# Altium footprint library PS1223-D32_R1_00301.PcbLib: 3 footprints
Each footprint in its own frame and in the unit in brackets; x right, y up, seen from the top. Pads: shape width x height; smd on the part's side, far side on the other; paste and mask are expansions set on the pad; w line width, h text height; cw(c..) or ccw(c..) is an arc to the next point about the centre after c.
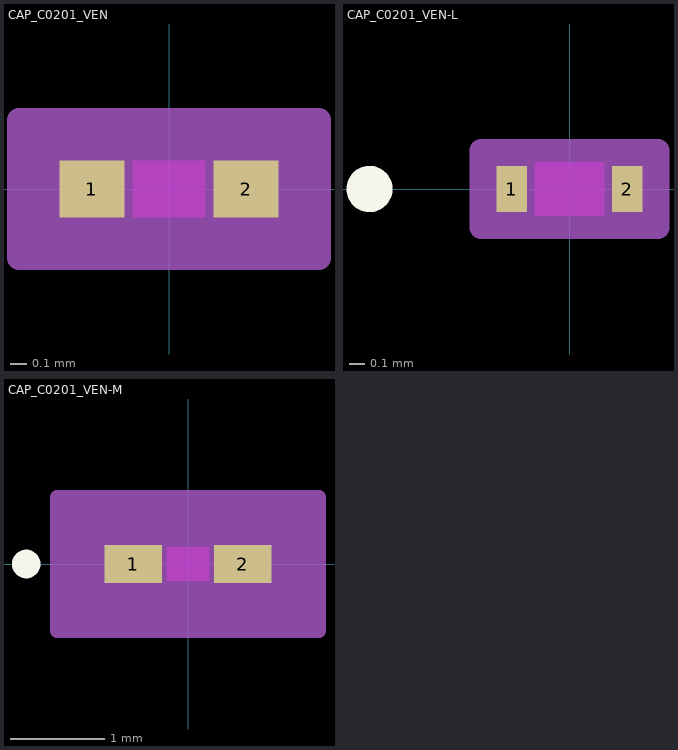
[diagram p0: the footprints below, top view; thin cyan lines are the x and y axes]

## CAP_C0201_VEN [mil]
pads (2):
  rect 16x14 smd paste+0 mask+0: 1(-19,0) 2(19,0)
Top Layer keep-out:
  region: -9,-5 -9,5 9,5 9,-5
Top Overlay:
  text ".Designator" at 20,-45 h50
Keep-Out Layer:
  region: -9,-7 -9,7 9,7 9,-7
Mechanical 13:
  lines w1: -13,-7 -13,7 ; -13,-7 13,-7 ; -13,-7 -11,-7 -11,7 -13,7 ; -13,-7 -13,7 ; -13,7 13,7 ; 13,-7 13,7 ; 13,-7 13,7 ; 13,-7 11,-7 11,7 13,7
  text ".Designator" at -30,10 h50
Mechanical 15:
  region: 37,-17 -37,-17 -37,17 37,17
  lines w6: -37,-17 37,-17 37,17 -37,17 -37,-17
3D body "CAP_C0201_VEN.step": height 7.99, standoff 0, extent -12.99,-7.01 12.99,7.01

## CAP_C0201_VEN-L [mil]
pads (2):
  rect 8x12 smd paste+0 mask+0: 1(-15,0) 2(15,0)
Top Layer keep-out:
  region: -9,-5 -9,5 9,5 9,-5
Top Overlay:
  circle w6: c-52,0 r3
  text ".Designator" at -137.5,-25 h50
Keep-Out Layer:
  region: -9,-7 -9,7 9,7 9,-7
Mechanical 13:
  circle w1: c-10,0 r3
  lines w1: -13,-7 -13,7 ; -13,-7 -11,-7 -11,7 -13,7 ; -13,-7 13,-7 ; -13,-7 -13,7 ; -13,7 13,7 ; 13,-7 11,-7 11,7 13,7 ; 13,-7 13,7 ; 13,-7 13,7
  text ".Designator" at -137.5,-25 h50
Mechanical 15:
  region: 23,-10 -23,-10 -23,10 23,10
  lines w6: -23,-10 -23,10 23,10 23,-10 -23,-10
3D body "CAP_C0201_VEN.step": height 7.99, standoff 0, extent -12.99,-7.01 12.99,7.01

## CAP_C0201_VEN-M [mil]
pads (2):
  rect 24x16 smd paste+0 mask+0: 1(-23,0) 2(23,0)
Top Layer keep-out:
  region: -9,-5 -9,5 9,5 9,-5
Top Overlay:
  circle w6: c-68,0 r3
  text ".Designator" at -137.5,-25 h50
Keep-Out Layer:
  region: -9,-7 -9,7 9,7 9,-7
Mechanical 13:
  circle w1: c-18,0 r3
  lines w1: -13,-7 -13,7 ; -13,-7 -11,-7 -11,7 -13,7 ; -13,-7 13,-7 ; -13,-7 -13,7 ; -13,7 13,7 ; 13,-7 11,-7 11,7 13,7 ; 13,-7 13,7 ; 13,-7 13,7
  text ".Designator" at -137.5,-25 h50
Mechanical 15:
  region: 55,-28 -55,-28 -55,28 55,28
  lines w6: -55,-28 -55,28 55,28 55,-28 -55,-28
3D body "CAP_C0201_VEN.step": height 7.99, standoff 0, extent -12.99,-7.01 12.99,7.01